# EAGLE library part TPL5111 (library madhu)
Texas Instruments Nano-Power System Timer for Power Gating datasheet <https://www.ti.com/lit/ds/symlink/tpl5111.pdf>
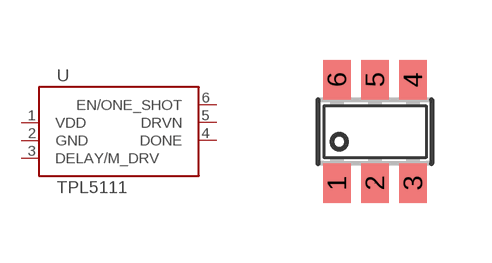
[diagram p32: symbol with the pads of SOT23-6; footprint SOT23-6]

Designator prefix U

## TPL5111DDCR  [SOT23-6]
1  VDD  pwr
2  GND  pwr
3  DELAY/M_DRV  in
4  DONE  out
5  DRVN  out
6  EN/ONE_SHOT  oc

## Footprint SOT23-6 (pad centres in mm)
Small Outline Transistor SOT753 - Philips Semiconductors Source: http://www.semiconductors.philips.com/acrobat_download/datasheets/74HC_HCT1G66_3.pdf
smd 0.69 x 0.99: 1 -0.95,-1.29; 2 0,-1.29; 3 0.95,-1.29; 4 0.95,1.3; 5 0,1.3; 6 -0.95,1.3